# Altium schematic symbol library SS8050.SchLib: 1 symbol
Pins are listed as number, name and electrical type; pins without a type are passive.

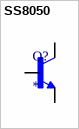
[diagram p0: symbol SS8050]

## SS8050
designator Q?
NPN Epitaxial Silicon Transistor; MF: ON Semiconductor / Fairchild; MP: SS8050; SnapEDA_Link: https://www.snapeda.com/parts/SS8050/Fairchild+Semiconductor/view-part/?ref=snap; Package: TO-92-3 ON Semiconductor; Value: *; Check_prices: https://www.snapeda.com/parts/SS8050/Fairchild+Semiconductor/view-part/?ref=eda
footprint SOT-23_BEC
pins: B, C, E